# Altium integrated library SMCJ15CA.IntLib: 1 symbol
Pins are listed as number, name and electrical type; pins without a type are passive.

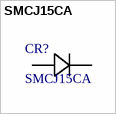
[diagram p0: symbol SMCJ15CA]

## SMCJ15CA
designator CR?
No Description Available; Manufacturer_Name: Bourns Electronics; Copyright: Copyright (C) 2026 Ultra Librarian. All rights reserved.; Manufacturer_Part_Number: SMCJ15CA
footprint DIODE_DO-214AC
pins: 1, 2